# Altium footprint library Capacitors_1206.PcbLib: 1 footprints
Each footprint in its own frame and in the unit in brackets; x right, y up, seen from the top. Pads: shape width x height; smd on the part's side, far side on the other; paste and mask are expansions set on the pad; w line width, h text height; cw(c..) or ccw(c..) is an arc to the next point about the centre after c.
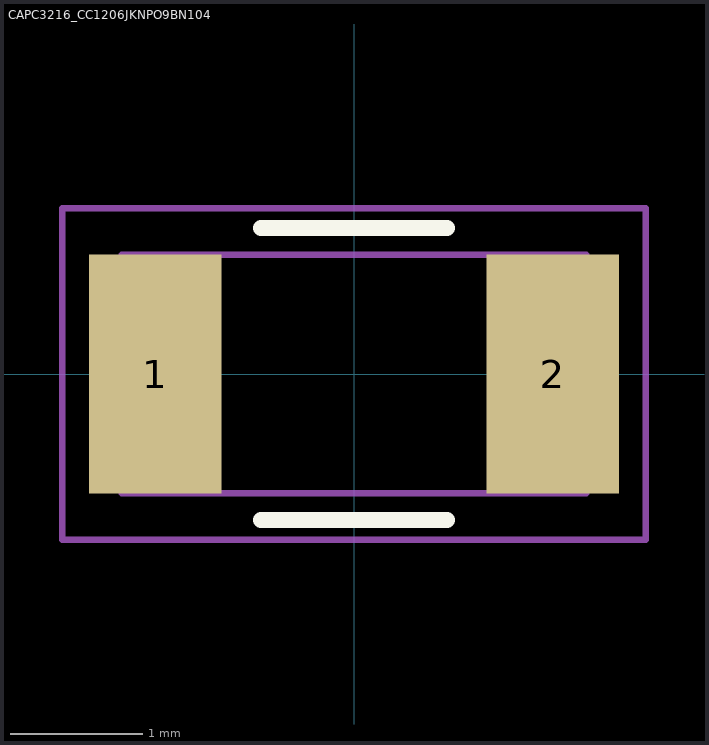
[diagram p0: the footprint, top view; thin cyan lines are the x and y axes]

## CAPC3216_CC1206JKNPO9BN104 [mm] "Yageo CC1206JKNPO9BN104; 100nF 50V 5% C0G; 1206"
height 1.8
pads (2):
  rect 1x1.8 smd paste+0 mask+0.05: 1(-1.5,0) 2(1.5,0)
Top Overlay:
  lines w0.12: -0.7,-1.1 0.7,-1.1 ; -0.7,1.1 0.7,1.1
Top 3D Body:
  lines w0.05: -2.2,-1.25 -2.2,1.25 2.2,1.25 2.2,-1.25 -2.2,-1.25
Top Courtyard:
  lines w0.05: -1.75,-0.9 -1.75,0.9 1.75,0.9 1.75,-0.9 -1.75,-0.9
3D body "CC1206JKNPO9BN104_OEM_MAX_Centered.step": height 1.8, standoff 0, extent -1.75,-0.9 1.75,0.9